# Altium schematic symbol library RoverLib.SchLib: 1 symbol
Pins are listed as number, name and electrical type; pins without a type are passive.

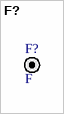
[diagram p0: symbol F?]

## F?
designator F?, comment F
Fiducial for JLCPCBA
footprint Fiducial_JLCPCB